# Altium schematic symbol library 2019-12-12_08-19-18.SchLib: 2 symbols
Pins are listed as number, name and electrical type; pins without a type are passive.

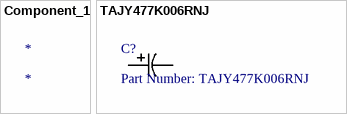
[diagram p0: symbols Component_1 to TAJY477K006RNJ]

## Component_1
designator *

## TAJY477K006RNJ
designator C?, comment Part Number: TAJY477K006RNJ
No Description Available; Vendor: AVX Corporation; Built_By: EMA_UL_Team; Type: DEV; Manufacturer_Part_Number: TAJY477K006RNJ; Copyright: Copyright (C) 2018 Accelerated Designs. All rights reserved; RefDes: RefDes; Value: Value
footprint TAJY
pins: 1, 2